# Altium schematic symbol library 3557-15.SchLib: 1 symbol
Pins are listed as number, name and electrical type; pins without a type are passive.

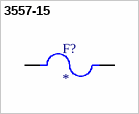
[diagram p0: symbol 3557-15]

## 3557-15
designator F?
Auto Fuse Holder; THM; Insulated Clip; 30 Amp; Blue | Keystone Electronics 3557-15; SnapEDA_Link: https://www.snapeda.com/parts/3557-15/Keystone/view-part/?ref=snap; Package: None; Value: *; MF: Keystone Electronics; MP: 3557-15; Check_prices: https://www.snapeda.com/parts/3557-15/Keystone/view-part/?ref=eda
footprint FUSE_3557-15
pins: 1_1 1, 1_2 1, 2_1 2, 2_2 2